# Altium schematic symbol library REF2033AIDDCT.SchLib: 1 symbol
Pins are listed as number, name and electrical type; pins without a type are passive.

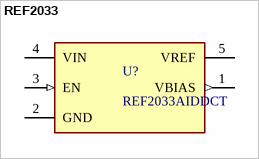
[diagram p0: symbol REF2033]

## REF2033
designator U?, comment REF2033AIDDCT
REF2033
footprint FP-DDC0005A-IPC_A
footprint FP-DDC0005A-IPC_B
footprint FP-DDC0005A-IPC_C
footprint FP-DDC0005A-MFG
pins: 1 VBIAS (out), 2 GND (power), 3 EN (in), 4 VIN (power), 5 VREF